# Altium schematic symbol library 2019-09-12_16-27-42.SchLib: 2 symbols
Pins are listed as number, name and electrical type; pins without a type are passive.

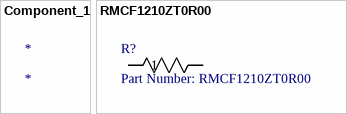
[diagram p0: symbols Component_1 to RMCF1210ZT0R00]

## Component_1
designator *

## RMCF1210ZT0R00
designator R?, comment Part Number: RMCF1210ZT0R00
No Description Available; Vendor: Stackpole International; Built_By: EMA_UL_Team; Manufacturer_Part_Number: RMCF1210ZT0R00; Copyright: Copyright (C) 2018 Accelerated Designs. All rights reserved; RefDes: RefDes; Type: DEV; Value: Value
footprint STA_RMCF1210
pins: 1, 2